# EAGLE library part LM2596S-5.0_NOPB (library LM2596S-5.0_NOPB)
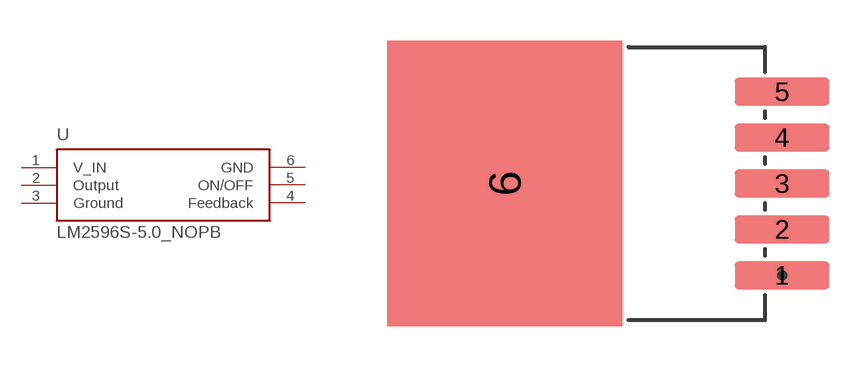
[diagram p0: symbol with the pads of C116713_TO-263-5; footprint C116713_TO-263-5]

Designator prefix U

## LM2596S-5.0_NOPB  [C116713_TO-263-5]
1  V_IN
2  Output
3  Ground
4  Feedback
5  ON/OFF
6  GND

## Footprint C116713_TO-263-5 (pad centres in mm)
LM2596S-5.0/NOPB — Clean-Room Clean-Room Metric Synthesis (TO263)
smd 3.5 x 1.02: 1 5.126,-3.4; 2 5.126,-1.7; 3 5.126,0; 4 5.126,1.7; 5 5.126,3.4
smd 8.705 x 10.587: 6 -5.126,0